# Altium schematic symbol library TitansLib.SchLib: 462 symbols (part 10 of 24)
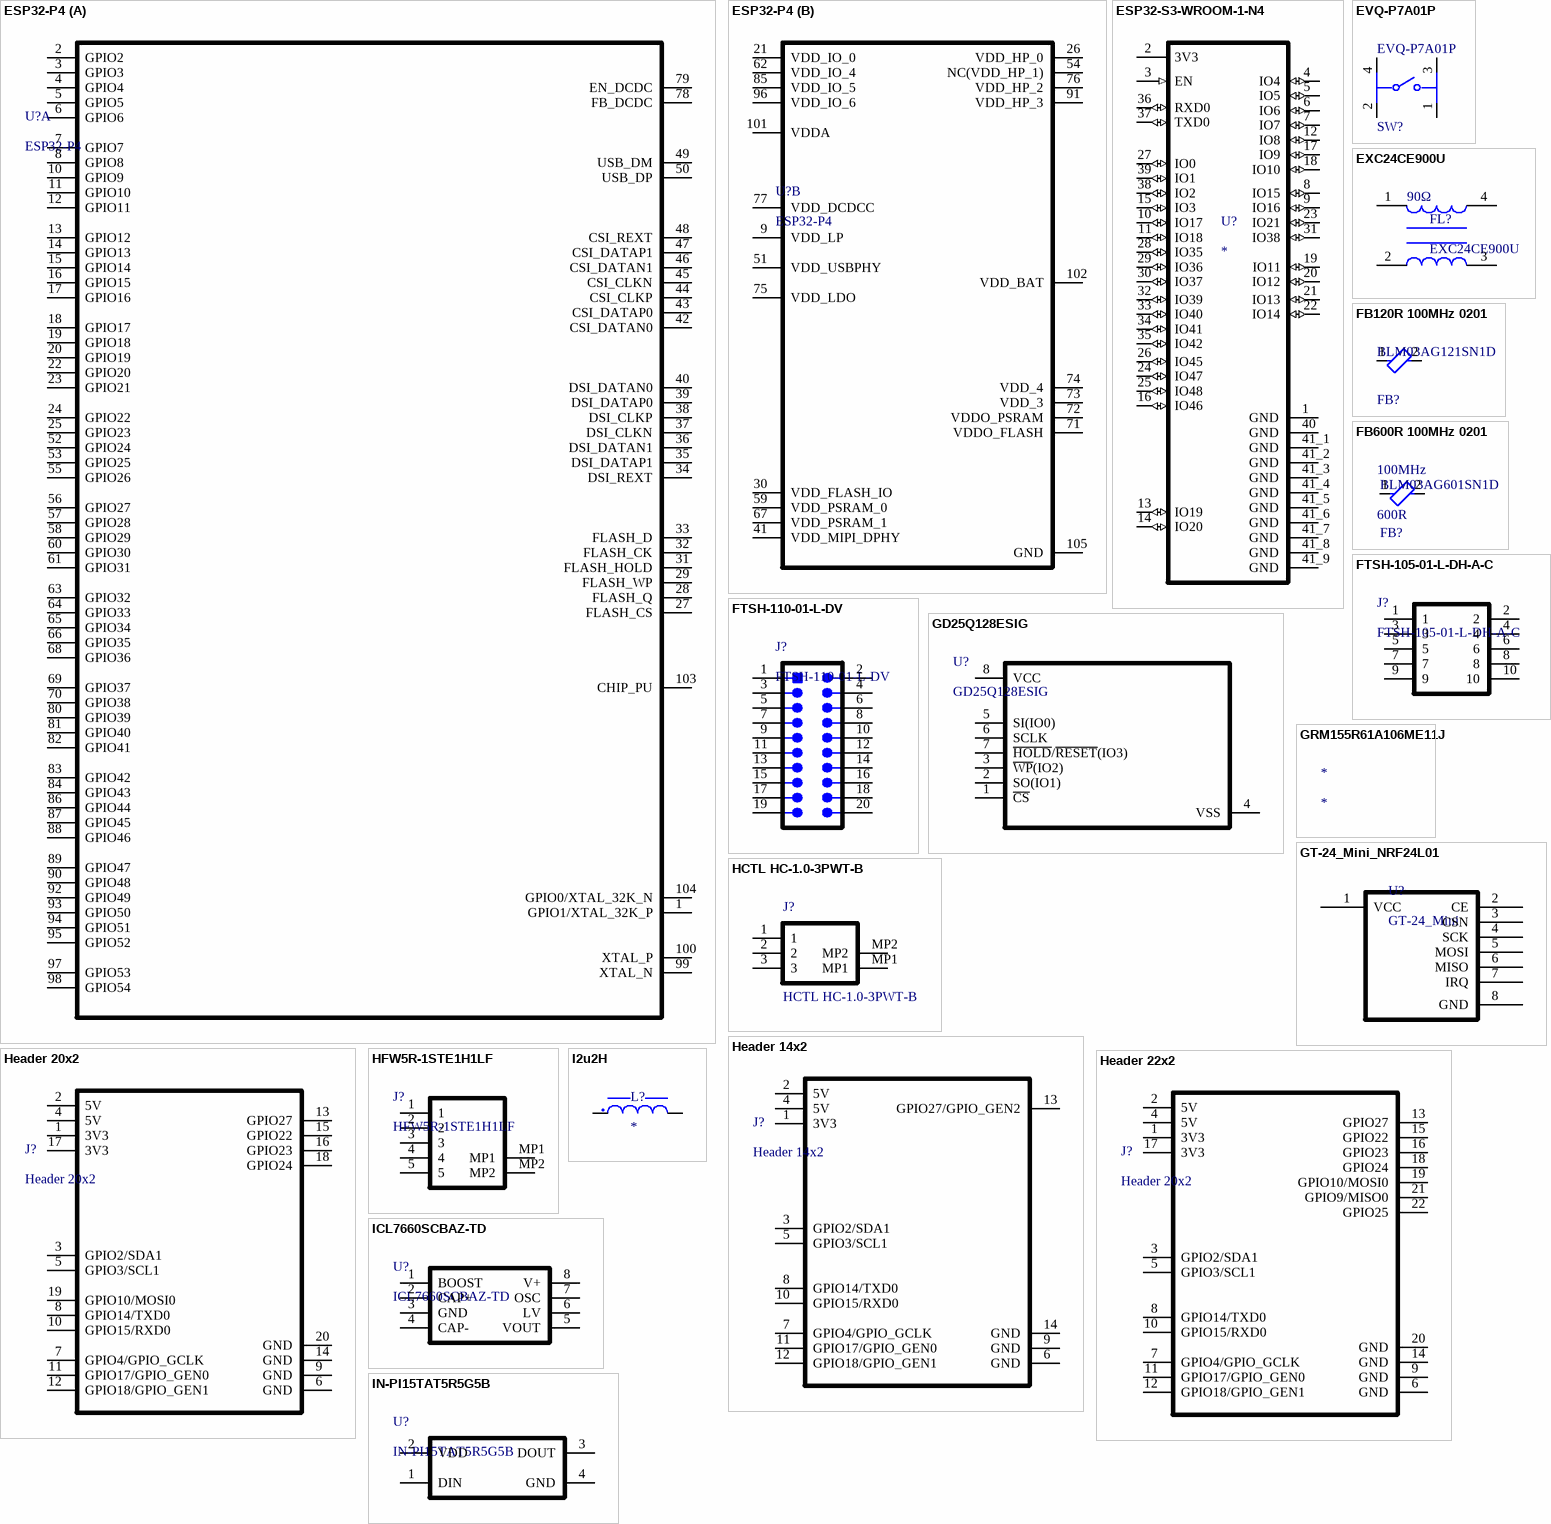
[diagram p26: symbols ESP32-P4 to IN-PI15TAT5R5G5B]

## Header 20x2
designator J?
Conn Unshrouded Header HDR 20 POS 2.54mm Solder ST Top Entry Thru-Hole BergStik®; Manufacturer: Amphenol Communications Solutions; Manufacturer Part Number: 67996-420HLF; Connector Type: Male Pin; Current Rating: 3A; Gender: Male; Insulation Resistance: 5GΩ; Lead Length: 2.41mm; Mating Post Length: 5.84mm; Max Voltage Rating (AC): 1.5kV; Number of Contacts: 20; Supplier: DigiKey; Supplier Part Number: 609-3221-ND; RoHS: Compliant; Category: Headers and Wire Housings; Stock: 10896; Pricing: 1=0.71, 10=0.6, 200=0.48555, 600=0.44927, 1000=0.43336, 5000=0.38684, 10000=0.36839 (USD); China RoHS: Compliant; Color: Black; Contact Gender: Male; Contact Material: Tin; Contact Mating Length: 5.842mm; Contact Plating: Tin; Depth: 4.83mm; Height: 8.71mm; Housing Color: Black; Housing Material: Thermoplastic; Length: 25.4mm; Lifecycle Status: Production; Max Operating Temperature: 125°C; Min Operating Temperature: -65°C; Mounting Technology: Through Hole; Pins: 20; Number of Positions: 20; Number of Rows: 2; Orientation: Straight; Packaging: Bulk; Pitch: 2.54mm; REACH SVHC: Yes; Row Spacing: 2.54mm; Terminal Pitch: 2.54mm; Termination: Solder; Voltage Rating: 1.5kV; ComponentLink1URL: https://datasheet.octopart.com:443/67996-420HLF-Amphenol-Communications-Solutions-datasheet-36854132.pdf?src-supplier=element14+APAC; ComponentLink1Description: https://datasheet.octopart.com:443/67996-420HLF-Amphenol-Communications-Solutions-datasheet-36854132.pdf?src-supplier=element14+APAC; ComponentLink2URL: https://datasheet.octopart.com:443/67996-420HLF-Areva-datasheet-10288749.pdf?src-supplier=Upverter; ComponentLink2Description: https://datasheet.octopart.com:443/67996-420HLF-Areva-datasheet-10288749.pdf?src-supplier=Upverter; ComponentLink3URL: https://datasheet.octopart.com:443/67996-420HLF-Areva-datasheet-10052131.pdf?src-supplier=Upverter; ComponentLink3Description: https://datasheet.octopart.com:443/67996-420HLF-Areva-datasheet-10052131.pdf?src-supplier=Upverter; ComponentLink4URL: https://datasheet.octopart.com:443/67996-420HLF-Areva-datasheet-8877144.pdf?src-supplier=Upverter; ComponentLink4Description: https://datasheet.octopart.com:443/67996-420HLF-Areva-datasheet-8877144.pdf?src-supplier=Upverter; ComponentLink5URL: https://datasheet.octopart.com:443/67996-420HLF-Areva-datasheet-8731571.pdf?src-supplier=Upverter; ComponentLink5Description: https://datasheet.octopart.com:443/67996-420HLF-Areva-datasheet-8731571.pdf?src-supplier=Upverter; ComponentLink6URL: https://datasheet.octopart.com:443/67996-420HLF-Areva-datasheet-8486089.pdf?src-supplier=Upverter; ComponentLink6Description: https://datasheet.octopart.com:443/67996-420HLF-Areva-datasheet-8486089.pdf?src-supplier=Upverter; ComponentLink7URL: https://datasheet.octopart.com:443/67996-420HLF-Amphenol-Communications-Solutions-datasheet-13408477.pdf?src-supplier=RS+(Formerly+Allied+Electronics); ComponentLink7Description: https://datasheet.octopart.com:443/67996-420HLF-Amphenol-Communications-Solutions-datasheet-13408477.pdf?src-supplier=RS+(Formerly+Allied+Electronics)
footprint Header2x20
pins: 1 3V3, 2 5V, 3 GPIO2/SDA1, 4 5V, 5 GPIO3/SCL1, 6 GND, 7 GPIO4/GPIO_GCLK, 8 GPIO14/TXD0, 9 GND, 10 GPIO15/RXD0, 11 GPIO17/GPIO_GEN0, 12 GPIO18/GPIO_GEN1, 13 GPIO27, 14 GND, 15 GPIO22, 16 GPIO23, 17 3V3, 18 GPIO24, 19 GPIO10/MOSI0, 20 GND

## Header 22x2
designator J?, comment Header 20x2
THT Vertical Pin Header WR-PHD, Pitch 2.54 mm, Dual Row, 22 pins; Manufacturer: Wurth Elektronik; Manufacturer Part Number: 61302221121; Connector Type: Male Pin; Contact Resistance: 20mΩ; Current Rating: 3A; Gender: Male; Number of Contacts: 22; Operating Supply Voltage: 250V; Pitch: 2.54mm; Supplier: DigiKey; Supplier Part Number: 732-5302-ND; RoHS: Compliant; Category: Headers and Wire Housings; Stock: 632; Pricing: 1=1.34, 10=1.136, 25=0.9476, 50=0.7894, 100=0.7173, 500=0.655 (USD); Color: Black; Contact Material: Copper; Contact Mating Length: 5.9944mm; Contact Plating: Gold; Lead Pitch: 2.54mm; Mounting Technology: Through Hole; Pins: 22; Number of Positions: 22; Number of Rows: 2; Orientation: Vertical; Packaging: Bulk; Row Spacing: 2.54mm; Termination: Solder; ComponentLink1URL: https://datasheet.octopart.com:443/61302221121-W%C3%BCrth-Elektronik-datasheet-45185731.pdf?src-supplier=Wurth+Elektronik; ComponentLink1Description: https://datasheet.octopart.com:443/61302221121-W%C3%BCrth-Elektronik-datasheet-45185731.pdf?src-supplier=Wurth+Elektronik; ComponentLink2URL: https://datasheet.octopart.com:443/61302221121-W%C3%BCrth-Elektronik-datasheet-149524204.pdf?src-supplier=Future+Electronics; ComponentLink2Description: https://datasheet.octopart.com:443/61302221121-W%C3%BCrth-Elektronik-datasheet-149524204.pdf?src-supplier=Future+Electronics; ComponentLink3URL: https://datasheet.octopart.com:443/61302221121-W%C3%BCrth-Elektronik-datasheet-10693404.pdf?src-supplier=Newark; ComponentLink3Description: https://datasheet.octopart.com:443/61302221121-W%C3%BCrth-Elektronik-datasheet-10693404.pdf?src-supplier=Newark
footprint Header2x22
pins: 1 3V3, 2 5V, 3 GPIO2/SDA1, 4 5V, 5 GPIO3/SCL1, 6 GND, 7 GPIO4/GPIO_GCLK, 8 GPIO14/TXD0, 9 GND, 10 GPIO15/RXD0, 11 GPIO17/GPIO_GEN0, 12 GPIO18/GPIO_GEN1, 13 GPIO27, 14 GND, 15 GPIO22, 16 GPIO23, 17 3V3, 18 GPIO24, 19 GPIO10/MOSI0, 20 GND, 21 GPIO9/MISO0, 22 GPIO25

## HFW5R-1STE1H1LF
designator J?
Ffc/Fpc Connector, 5 Contact(S), 1 Row(S), Female, Right Angle, 0.039 Inch Pitch, Surface Mount; Manufacturer: Amphenol Communications Solutions; Contact Resistance: 30mΩ; Current Rating: 1A; Insulation Resistance: 500MΩ; Plating Thickness: 2.0066µm; Supplier: DigiKey; Supplier Part Number: 609-HFW5R-1STE1H1LFCT-ND; Manufacturer Part Number: HFW5R-1STE1H1LF; RoHS: Compliant; Category: Card Edge Connectors; Stock: 41920; Pricing: 1=0.24, 10=0.208, 25=0.1948, 50=0.1856, 100=0.1766, 250=0.16556, 500=0.15764, 1000=0.15011 (USD); Contact Gender: Female; Lifecycle Status: Production; Max Operating Temperature: 105°C; Min Operating Temperature: -55°C; Pins: 5; Number of Rows: 1; REACH SVHC: Yes; Terminal Pitch: 1mm; ComponentLink1URL: https://datasheet.octopart.com:443/HFW5R-1STE1H1LF-Amphenol-Communications-Solutions-datasheet-154833502.pdf?src-supplier=Master+Electronics; ComponentLink1Description: https://datasheet.octopart.com:443/HFW5R-1STE1H1LF-Amphenol-Communications-Solutions-datasheet-154833502.pdf?src-supplier=Master+Electronics; ComponentLink2URL: https://datasheet.octopart.com:443/HFW5R-1STE1H1LF-Amphenol-Communications-Solutions-datasheet-189096500.pdf?src-supplier=Electro+Sonic; ComponentLink2Description: https://datasheet.octopart.com:443/HFW5R-1STE1H1LF-Amphenol-Communications-Solutions-datasheet-189096500.pdf?src-supplier=Electro+Sonic; Supplier 1: DigiKey; Supplier Part Number 1: 609-HFW5R-1STE1H1LFCT-ND; Supplier 2: DigiKey; Supplier Part Number 2: 609-HFW5R-1STE1H1LFTR-ND; Supplier 3: Mouser; Supplier Part Number 3: 649-HFW5R-1STE1H1LF
footprint HFW5R-1STE1H1LF
pins: 1, 2, 3, 4, 5, MP1, MP2

## I2u2H
designator L?
FIXED IND 2.2UH 3.25A 0.061OHM; MF: WÃ¼rth Elektronik; MP: 74437324022; SnapEDA_Link: https://www.snapeda.com/parts/74437324022/W%25C3%25BCrth+Elektronik+Midcom/view-part/?ref=snap; Package: Nonstandard WÃ¼rth Elektronik; Value: *; Check_prices: https://www.snapeda.com/parts/74437324022/W%25C3%25BCrth+Elektronik+Midcom/view-part/?ref=eda
footprint WE-LHMI_4020
pins: 1, 2

## ICL7660SCBAZ-TD
designator U?
Inverted 5kHz SOP-8 Voltage Regulators - DC DC Switching Regulators RoHS; Manufacturer 1: TDSEMIC; Datasheet Link: https://www.lcsc.com/datasheet/C42421902.pdf; Height: 1.75mm; Manufacturer Part Number 1: ICL7660SCBAZ-TD; Supplier Part Number 1: C42421902; Supplier Link 1: https://www.lcsc.com/product-detail/C42421902.html?s_z=n_ICL7660SCBAZ; Supplier 1: LCSC; Supplier Unit Price 1: 0.207
footprint SOIC127P600X175-8N
pins: 1 BOOST, 2 CAP+, 3 GND, 4 CAP-, 5 VOUT, 6 LV, 7 OSC, 8 V+

## IN-PI15TAT5R5G5B
designator U?
Triple Color LED, Red/green/blue, 1.5mm; Manufacturer 1: Inolux; Number of Circuits: 1; Shape: Square; Supplier 1: DigiKey; Supplier Part Number 1: 1830-IN-PI15TAT5R5G5BCT-ND; Manufacturer Part Number 1: IN-PI15TAT5R5G5B; RoHS: Compliant; Category: LEDs; Stock: 28900; Supplier Unit Price ': 0.51; Height: 650µm; Max Operating Temperature: 80°C; Min Operating Temperature: -40°C; Mounting Technology: Surface Mount; Number of Terminals: 4; Packaging: Bulk; REACH SVHC: Yes; Terminal Pitch: 900µm
footprint IN-PI15TAT5R5G5B
pins: 1 DIN, 2 VDD, 3 DOUT, 4 GND

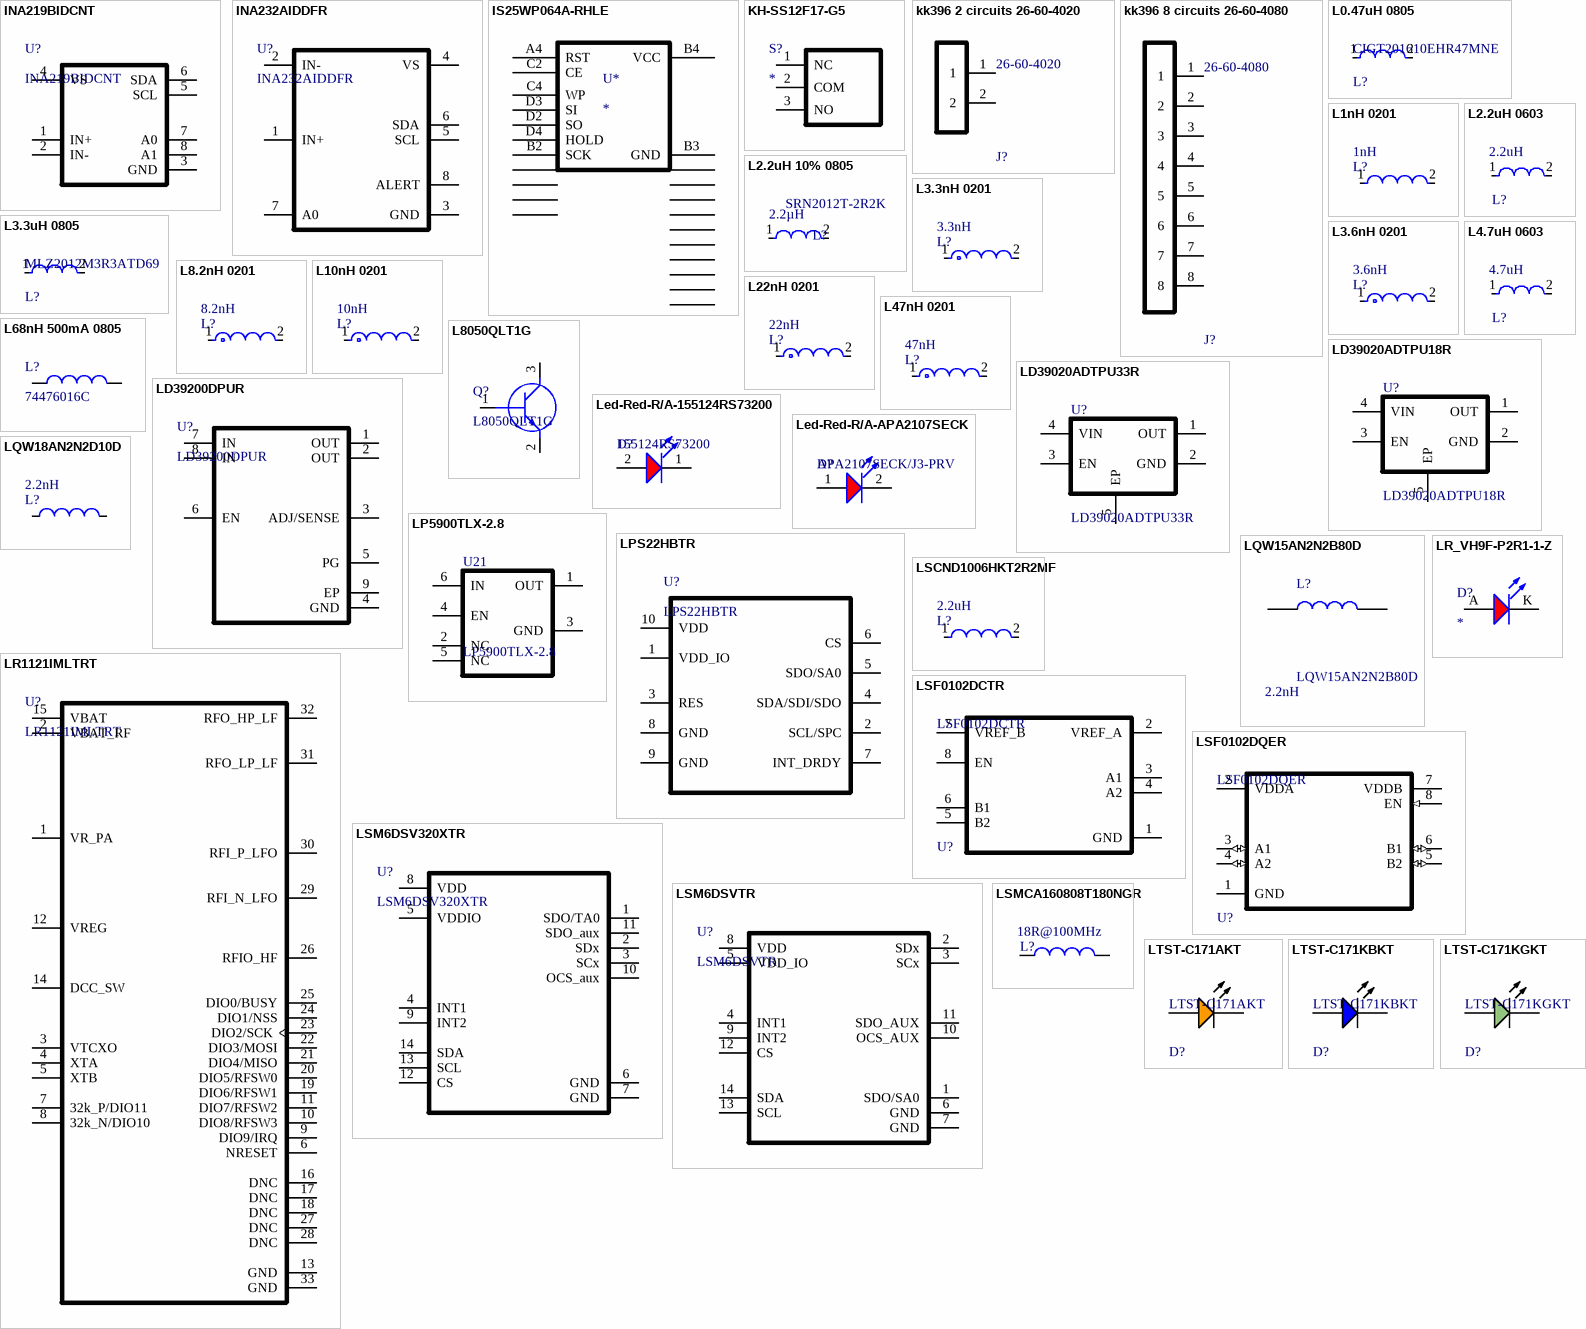
[diagram p6: symbols INA219BIDCNT to LTST-C171KGKT]

## INA219BIDCNT
designator U?
Power Supply Support Circuit, Fixed, 2 Channel, 2V, PDSO8; Manufacturer: Texas Instruments; Package Body Material: Plastic; Adjustable Threshold: No; Number of Channels: 2; Channels: 1; Package Equivalence Code: TSSOP8,.1; Power Supplies: 3.3V; Supply Current-Max (Isup): 1mA; Max Supply Voltage: 5.5V; Min Supply Voltage: 3V; Qualification Status: Not Qualified; Supplier: Digikey; Supplier Part Number: 296-27898-1-ND; Manufacturer Part Number: INA219BIDCNT; RoHS: Yes; Category: Amplifiers - Op Amps, Buffer, Instrumentation; Stock: 1316; Pricing: 1=2.9, 10=2.171, 25=1.988, 100=1.7864 (USD); Case/Package: LSSOP; Pins: 8; Package Shape: Rectangular; Terminal Finish: Nickel; Min Operating Temperature: -40°C; Max Operating Temperature: 125°C; JESD-609 Code: e4; Throw Configuration: POWER SUPPLY SUPPORT CIRCUIT; JESD-30 Code: R-PDSO-G8; Moisture Sensitivity Level: 2; Package Style: SMALL OUTLINE, LOW PROFILE, SHRINK PITCHMeter; Peak Reflow Temperature (Cel): 260°C; Nominal Supply Voltage: 3.3V; Surface Mount: Yes; Terminal Form: Gull Wing; Terminal Position: DUAL; Length: 2.9mm; Width: 1.6mm; Height - Seated (Max): 1.45mm; Terminal Pitch: 0.65mm; Temperature Grade: AUTOMOTIVE; Reach SVHC Compliant: Yes; RoHS Compliant: Yes; ComponentLink1URL: https://www.ti.com:443/lit/ds/symlink/ina219.pdf?src-supplier=IHS+Markit; ComponentLink1Description: https://www.ti.com:443/lit/ds/symlink/ina219.pdf?src-supplier=IHS+Markit; ComponentLink2URL: https://datasheet.ciiva.com/1492/ina219-1492144.pdf?src-supplier=Farnell; ComponentLink2Description: https://datasheet.ciiva.com/1492/ina219-1492144.pdf?src-supplier=Farnell; ComponentLink3URL: https://datasheet.ciiva.com/14180/ina219-end-ds-14180063.pdf?src-supplier=Distrelec; ComponentLink3Description: https://datasheet.ciiva.com/14180/ina219-end-ds-14180063.pdf?src-supplier=Distrelec; ComponentLink4URL: https://datasheet.ciiva.com/15132/getdatasheetpartid-294384-15132604.pdf?src-supplier=Verical; ComponentLink4Description: https://datasheet.ciiva.com/15132/getdatasheetpartid-294384-15132604.pdf?src-supplier=Verical; ComponentLink5URL: https://datasheet.ciiva.com/1939/ina219-1939657.pdf?src-supplier=Digikey; ComponentLink5Description: https://datasheet.ciiva.com/1939/ina219-1939657.pdf?src-supplier=Digikey; ComponentLink6URL: https://datasheet.ciiva.com/1939/ina219-1939658.pdf?src-supplier=Digikey; ComponentLink6Description: https://datasheet.ciiva.com/1939/ina219-1939658.pdf?src-supplier=Digikey; ComponentLink7URL: https://datasheet.ciiva.com/1939/ina219-1939659.pdf?src-supplier=Digikey; ComponentLink7Description: https://datasheet.ciiva.com/1939/ina219-1939659.pdf?src-supplier=Digikey; ComponentLink8URL: https://datasheet.ciiva.com/2965/ina219-2965730.pdf?src-supplier=Avnet; ComponentLink8Description: https://datasheet.ciiva.com/2965/ina219-2965730.pdf?src-supplier=Avnet; ComponentLink9URL: https://datasheet.ciiva.com/1484/1725057-1484940.pdf?src-supplier=Element14; ComponentLink9Description: https://datasheet.ciiva.com/1484/1725057-1484940.pdf?src-supplier=Element14
footprint SOT23_8 (SOT23, 8-Leads, Body 3x1.75mm, Pitch 0.65mm, IPC Low Density)
pins: 1 IN+, 2 IN-, 3 GND, 4 VS, 5 SCL, 6 SDA, 7 A0, 8 A1

## INA232AIDDFR
designator U?
48-V, 16-bit high-precision I²C output digital power monitor with alert 8-SOT-23-THIN -40 to 125; Manufacturer: Texas Instruments; Manufacturer Lifecycle Status: ACTIVE; Supplier: DigiKey; Supplier Part Number: 296-INA232AIDDFRCT-ND; Manufacturer Part Number: INA232AIDDFR; RoHS: Compliant; Category: Amplifiers - Op Amps, Buffer, Instrumentation; Stock: 56351; Pricing: 1=1.81, 10=1.331, 25=1.2108, 100=1.0789, 250=1.01592, 500=0.97796, 1000=0.94672 (USD); Height: 1.1mm; Length: 2.9mm; Lifecycle Status: Production; Pins: 8; Thickness: 850µm; Width: 1.6mm; ComponentLink1URL: https://sigma.octopart.com:443/179816939/technical_drawing/Texas-Instruments-INA232AIDDFR.pdf?src-supplier=Texas+Instruments; ComponentLink1Description: https://sigma.octopart.com:443/179816939/technical_drawing/Texas-Instruments-INA232AIDDFR.pdf?src-supplier=Texas+Instruments; ComponentLink2URL: https://octopart.com:443/opatz8j6/c1?t=tdcfrfqlwMMvvah5lNUfK0MzpbXfhr8Ppm7Qm2sQp30Znx2F_TE0U3qagWPwHuY8wCYu6NZgeB7h5wJcviHvOBj91G8t2zmsw1ir4e8XVxl_AkrUR1Q7hlbS7AqVegXtlb1UQ0cUuezrbYL1CWbHgObrkgHRgBQUmOFsUdfdaIVoH-iZCWphwrizwSyTPPQoPQXjcu9aZnEDXH83wP6yWy30kqFWMAB2Y55cF7h0oPREyqdZo_whrT0G2HMY5r0-RtWScHvstvJZ-xUCg6VGekmohWS3IcqBHUTZnmfjF6gP6ju7OJa-OC3COYZu65hqQ0Qlo-R8JF_oacVkJD61faW_3iE5_4-CLPsP_Tfry8LzxNbisJ6SfddldquHlpcKEkocSto&src-supplier=Texas+Instruments; ComponentLink2Description: https://octopart.com:443/opatz8j6/c1?t=tdcfrfqlwMMvvah5lNUfK0MzpbXfhr8Ppm7Qm2sQp30Znx2F_TE0U3qagWPwHuY8wCYu6NZgeB7h5wJcviHvOBj91G8t2zmsw1ir4e8XVxl_AkrUR1Q7hlbS7AqVegXtlb1UQ0cUuezrbYL1CWbHgObrkgHRgBQUmOFsUdfdaIVoH-iZCWphwrizwSyTPPQoPQXjcu9aZnEDXH83wP6yWy30kqFWMAB2Y55cF7h0oPREyqdZo_whrT0G2HMY5r0-RtWScHvstvJZ-xUCg6VGekmohWS3IcqBHUTZnmfjF6gP6ju7OJa-OC3COYZu65hqQ0Qlo-R8JF_oacVkJD61faW_3iE5_4-CLPsP_Tfry8LzxNbisJ6SfddldquHlpcKEkocSto&src-supplier=Texas+Instruments; ComponentLink3URL: https://sigma.octopart.com:443/178868995/technical_drawing/Texas-Instruments-INA232AIDDFR.pdf?src-supplier=Texas+Instruments; ComponentLink3Description: https://sigma.octopart.com:443/178868995/technical_drawing/Texas-Instruments-INA232AIDDFR.pdf?src-supplier=Texas+Instruments; ComponentLink4URL: https://sigma.octopart.com:443/165875829/technical_drawing/Texas-Instruments-INA232AIDDFR.pdf?src-supplier=Texas+Instruments; ComponentLink4Description: https://sigma.octopart.com:443/165875829/technical_drawing/Texas-Instruments-INA232AIDDFR.pdf?src-supplier=Texas+Instruments; ComponentLink5URL: http://sigma.octopart.com:80/reach_statement/Texas-Instruments-company-64.pdf?src-supplier=Compliance+Statements; ComponentLink5Description: http://sigma.octopart.com:80/reach_statement/Texas-Instruments-company-64.pdf?src-supplier=Compliance+Statements; ComponentLink6URL: http://sigma.octopart.com:80/conflict_mineral_statement/Texas-Instruments-company-63.pdf?src-supplier=Compliance+Statements; ComponentLink6Description: http://sigma.octopart.com:80/conflict_mineral_statement/Texas-Instruments-company-63.pdf?src-supplier=Compliance+Statements; Supplier 1: DigiKey; Supplier Part Number 1: 296-INA232AIDDFRCT-ND; Supplier 2: DigiKey; Supplier Part Number 2: 296-INA232AIDDFRTR-ND; Supplier 3: Mouser; Supplier Part Number 3: 595-INA232AIDDFR
footprint INA32AIDDFR
pins: 1 IN+, 2 IN-, 3 GND, 4 VS, 5 SCL, 6 SDA, 7 A0, 8 ALERT

## IS25WP064A-RHLE
designator U*
NOR Flash Serial-SPI 1.8V 64Mbit 8M X 8bit 7ns/8ns 24-Pin TFBGA Tray; Manufacturer: ISSI; Manufacturer Part Number: IS25WP064A-RHLE; Interface: Serial; Clock Frequency: 133MHz; Max Supply Current: 29mA; Max Supply Voltage: 1.95V; Min Supply Voltage: 1.65V; Number of Circuits: 1; Supplier: DigiKey; Supplier Part Number: 706-1647-ND; RoHS: Compliant; Category: Flash; Stock: 443; Pricing: 1=3,02, 10=2,819, 25=2,7372, 50=2,6752, 100=2,6129, 480=2,47269, 960=2,4115, 1440=2,37603 (USD); China RoHS: Compliant; Country of Origin: Mainland China, Taiwan; Export Control Classification Number (ECCN) Code: EAR99; Height - Seated (Max): 1.2mm; Harmonized Tariff Schedule (HTS) Code: 8542.32.00.51; Introduction Date: 2016-02-01; Length: 5mm; Lifecycle Status: Production; Max Operating Temperature: 105°C; Memory Format: FLASH; Min Operating Temperature: -40°C; Number of Terminals: 24; Operating Supply Voltage: 1.8V; REACH SVHC: Yes; Temperature Grade: Industrial; Terminal Pitch: 1mm; Width: 5mm; ComponentLink1URL: https://datasheet.octopart.com:443/IS25WP064A-RHLE-ISSI-datasheet-154716939.pdf?src-supplier=IHS; ComponentLink1Description: https://datasheet.octopart.com:443/IS25WP064A-RHLE-ISSI-datasheet-154716939.pdf?src-supplier=IHS; ComponentLink2URL: https://datasheet.octopart.com:443/IS25WP064A-RHLE-ISSI-datasheet-157246014.pdf?src-supplier=SHENGYU+ELECTRONICS; ComponentLink2Description: https://datasheet.octopart.com:443/IS25WP064A-RHLE-ISSI-datasheet-157246014.pdf?src-supplier=SHENGYU+ELECTRONICS; Supplier 1: DigiKey; Supplier Part Number 1: 706-1647-ND; Supplier 2: Mouser; Supplier Part Number 2: 870-IS25WP064A-RHLE
footprint IS25WP064A (BGA, 24-Leads, Body 6,00x8,00mmx1,20mm, Pitch 1,00mm)
pins: A1 NC hidden, A2 NC hidden, A3 NC hidden, A4 RST, B1 NC hidden, B2 SCK, B3 GND, B4 VCC, C1 NC hidden, C2 CE, C3 NC hidden, C4 WP, D1 NC hidden, D2 SO, D3 SI, D4 HOLD, E1 NC hidden, E2 NC hidden, E3 NC hidden, E4 NC hidden, F1 NC hidden, F2 NC hidden, F3 NC hidden, F4 NC hidden

## KH-SS12F17-G5
designator S?
Switch; Manufacturer_Name: Shenzhen Kinghelm Elec; Manufacturer_Part_Number: KH-SS12F17-G5; Datasheet Link: https://www.kinghelm.net/slide-switch/501830.html; Height: 8.7mm
footprint KHSS12F17G5
pins: 1 NC, 2 COM, 3 NO

## kk396 2 circuits 26-60-4020
designator J?, comment 26-60-4020
CONN HEADER VERT 2POS 3.96MM; Number of Contacts: 2; Contact Resistance: 6mR; Current Rating: 7A; Gender: Male; Voltage Rating: 250V; Number of Lines: 1; Approvals: UL; Glow Wire Compliant: Non-compliant; Depth: 10.01mm; Color: Natural; Mount: Through Hole; Flammability Rating: UL94 V-0; Max Operating Temperature: 75°C; Termination: Solder; Lead Free: Lead Free; Length: 7.77mm; Height: 14.73mm; Min Operating Temperature: 0°C; Contact Gender: Male; Housing Material: Polyester; Number of Rows: 1; Material: Polyester; Fastening Type: Friction; Contact Material: Brass; Radiation Hardening: No; Pitch: 3.96mm; Number of Circuits: 2; Contact Plating: Tin; Packaging: Bulk; Housing Color: Natural; Contact Mating Length: 0.45inch; Contact Type: Male Pin; Number of Positions: 2; Orientation: Straight; Package Quantity: 1400; Series: KK® 41791; Max Voltage Rating (AC): 250V; RoHS Compliant: Yes; Max Current Rating: 7A; Number of Poles: 2
footprint FP-26-60-4020-MFG
pins: 1, 2

## kk396 8 circuits 26-60-4080
designator J?, comment 26-60-4080
26-60-4080 3.96mm (.156") Pitch KK® Solid Header, Vertical, Friction Lock, 8 Circuits, Tin (Sn) Plating; Manufacturer Lifecycle Status: ACTIVE; NexarPartId: 111878; Contact Resistance: 6mΩ; Voltage Rating: 250V; Gender: Male; Number of Positions: 8; Number of Lines: 1; Approvals: CSA, UL; Insulation Resistance: 50GΩ; Current Rating: 7A; Glow Wire Compliant: Non-compliant; Orientation: Vertical; Contact Gender: Male; Voltage Rating (AC): 250V; Radiation Hardening: No; Number of Contacts: 8; Height: 14.73mm; Max Operating Temperature: 75°C; Number of Rows: 1; RoHS: Compliant; REACH SVHC: Unknown; Packaging: Bulk; Color: Natural; Number of Circuits: 8; Pitch: 3.96mm; Depth: 10.01mm; Voltage Rating (DC): 250V; Housing Color: Natural; Lead Free: Lead Free; Plating: Tin; Country of Origin: US; Number of Pins: 8; Material: Polyester; Mount: Through Hole; Lifecycle Status: Production; Termination: Solder; Number of Poles: 8; Length: 31.55mm; Max Voltage Rating (AC): 250V; Contact Plating: Tin; Contact Material: Brass, Tin; Schedule B: 8536694040|8536694040|8536694040|8536694040|8536694040|8536694040|8536694040|8536694040|8536694040|8536694040|8536694040|8536694040|8536694040|8536694040|8536694040|8536694040|8536694040|8536694040|8536694040|8536694040|8536694040|8536694040|8536694040|85; Flammability Rating: UL94 V-0; Max Current Rating: 7A; Lead Pitch: 3.96mm; Housing Material: Polyester; Min Operating Temperature: -40°C
footprint FP-26-60-4080-MFG
pins: 1, 2, 3, 4, 5, 6, 7, 8

## L0.47uH 0805
designator L?, comment CIGT201610EHR47MNE
470 nH Shielded Thin Film Inductor 4.8 A 22mOhm Max 0806 (2016 Metric); Manufacturer: TDK; Manufacturer Part Number: MLZ2012M3R3ATD69; Manufacturer Lifecycle Status: PRODUCTION; Core Material: Ferrite; Current Rating: 500mA; DC Resistance (DCR): 260mΩ; Value: 3.3µH; Max Current Rating: 350mA; Number of Circuits: 1; Test Frequency: 2MHz; Tolerance: 20%; Supplier: DigiKey; Supplier Part Number: 445-180843-1-ND; RoHS: Compliant; Category: Fixed Inductors; Stock: 46052; Pricing: 1=0.3, 10=0.248, 25=0.2292, 50=0.2162, 100=0.2038, 250=0.18856, 500=0.17776, 1000=0.1676 (USD); Case/Package: 0805; Height: 1.25mm; Length: 2mm; Lifecycle Status: Production; Max Length: 2.2mm; Max Operating Temperature: 125°C; Max Width: 1.45mm; Min Length: 1.8mm; Min Operating Temperature: -55°C; Min Width: 1.05mm; Number of Terminals: 2; Ratings: AEC-Q200; REACH SVHC: Yes; RMS Current (Irms): 500mA; Saturation Current: 350mA; Schedule B: 8504500000, 8504500000|8504500000|8504500000|8504500000|8504500000; ESR: 260mΩ; Shielding: Shielded; Width: 1.25mm; ComponentLink1URL: https://datasheet.octopart.com:443/MLZ2012M3R3ATD69-TDK-datasheet-181268424.pdf?src-supplier=IHS; ComponentLink1Description: https://datasheet.octopart.com:443/MLZ2012M3R3ATD69-TDK-datasheet-181268424.pdf?src-supplier=IHS; ComponentLink2URL: https://datasheet.octopart.com:443/MLZ2012M3R3ATD69-TDK-datasheet-155380170.pdf?src-supplier=TDK; ComponentLink2Description: https://datasheet.octopart.com:443/MLZ2012M3R3ATD69-TDK-datasheet-155380170.pdf?src-supplier=TDK; ComponentLink3URL: https://datasheet.octopart.com:443/MLZ2012M3R3ATD69-TDK-datasheet-165734126.pdf?src-supplier=Burklin+Elektronik; ComponentLink3Description: https://datasheet.octopart.com:443/MLZ2012M3R3ATD69-TDK-datasheet-165734126.pdf?src-supplier=Burklin+Elektronik; ComponentLink4URL: https://datasheet.octopart.com:443/MLZ2012M3R3ATD69-TDK-datasheet-137868124.pdf?src-supplier=Future+Electronics; ComponentLink4Description: https://datasheet.octopart.com:443/MLZ2012M3R3ATD69-TDK-datasheet-137868124.pdf?src-supplier=Future+Electronics; ComponentLink5URL: https://datasheet.octopart.com:443/MLZ2012M3R3ATD69-TDK-datasheet-136874819.pdf?src-supplier=TME; ComponentLink5Description: https://datasheet.octopart.com:443/MLZ2012M3R3ATD69-TDK-datasheet-136874819.pdf?src-supplier=TME; Supplier 1: DigiKey; Supplier Part Number 1: 1276-6902-1-ND; Supplier 2: DigiKey; Supplier Part Number 2: 1276-6902-6-ND
footprint MLZ2012-1_25
pins: 1, 2

## L1nH 0201
designator L?, comment value 1nH  (hidden comment: LQP03TN1N0B02D)
Inductor RF Chip Thin Film 1nH 0.1nH 500MHz 14Q-Factor 750mA 100mOhm DCR 0201 Paper T/R; Manufacturer: Murata; Manufacturer Lifecycle Status: IN PRODUCTION; Core Material: Non-Magnetic; Current: 600mA; DC Resistance (DCR): 100mΩ; Number of Circuits: 1; Q Factor: 14; Self Resonant Frequency: 17GHz; Shielding: Unshielded; Tolerance: 10%; Supplier: DigiKey; Supplier Part Number: 490-6714-1-ND; Manufacturer Part Number: LQP03TN1N0B02D; RoHS: Compliant; Category: Fixed Inductors; Stock: 282641; Pricing: 1=0.1, 10=0.03, 100=0.0245, 1000=0.02015, 5000=0.01757 (USD); Ambient Temperature Range High: 125°C; Case/Package: 0201; Case Code (Imperial): 0201; Case Code (Metric): 0603; Composition: Thin Film; Country of Origin: Japan; Current Rating: 750mA; DC Current: 750mA; Depth: 330µm; Export Control Classification Number (ECCN) Code: EAR99; Height: 300µm; Height - Seated (Max): 330.2µm; Harmonized Tariff Schedule (HTS) Code: 8504.50.80.00; Introduction Date: 2010-04-15; Length: 600µm; Lifecycle Status: Production; Max Current Rating: 750mA; Max DC Current: 750mA; Max Operating Temperature: 125°C; Military Standard: Not; Min Operating Temperature: -55°C; Mounting Technology: Surface Mount; Number of Terminals: 2; Packaging: Cut Tape; Radiation Hardening: No; REACH SVHC: Yes; RMS Current (Irms): 750mA; Schedule B: 8504500000, 8504500000|8504500000, 8504500000|8504500000|8504500000, 8504500000|8504500000|8504500000|8504500000; ESR: 100mΩ; Termination: SMD/SMT; Test Frequency: 500MHz; Width: 300µm; ComponentLink1URL: https://datasheet.octopart.com:443/LQP03TN1N0B02D-Murata-datasheet-39128545.pdf?src-supplier=Newark; ComponentLink1Description: https://datasheet.octopart.com:443/LQP03TN1N0B02D-Murata-datasheet-39128545.pdf?src-supplier=Newark; ComponentLink2URL: https://datasheet.octopart.com:443/LQP03TN1N0B02D-Murata-datasheet-11551019.pdf?src-supplier=_legacy+Avnet; ComponentLink2Description: https://datasheet.octopart.com:443/LQP03TN1N0B02D-Murata-datasheet-11551019.pdf?src-supplier=_legacy+Avnet; ComponentLink3URL: https://datasheet.octopart.com:443/LQP03TN1N0B02D-Murata-datasheet-140715373.pdf?src-supplier=Ciiva; ComponentLink3Description: https://datasheet.octopart.com:443/LQP03TN1N0B02D-Murata-datasheet-140715373.pdf?src-supplier=Ciiva; ComponentLink4URL: https://datasheet.octopart.com:443/LQP03TN1N0B02D-Murata-datasheet-138756448.pdf?src-supplier=Ciiva; ComponentLink4Description: https://datasheet.octopart.com:443/LQP03TN1N0B02D-Murata-datasheet-138756448.pdf?src-supplier=Ciiva; ComponentLink5URL: https://datasheet.octopart.com:443/LQP03TN1N0B02D-Murata-datasheet-142046051.pdf?src-supplier=Arrow.cn; ComponentLink5Description: https://datasheet.octopart.com:443/LQP03TN1N0B02D-Murata-datasheet-142046051.pdf?src-supplier=Arrow.cn; ComponentLink6URL: https://datasheet.octopart.com:443/LQP03TN1N0B02D-Murata-datasheet-141404629.pdf?src-supplier=TME; ComponentLink6Description: https://datasheet.octopart.com:443/LQP03TN1N0B02D-Murata-datasheet-141404629.pdf?src-supplier=TME; ComponentLink7URL: https://datasheet.octopart.com:443/LQP03TN1N0B02D-Murata-datasheet-80324116.pdf?src-supplier=Geoflip; ComponentLink7Description: https://datasheet.octopart.com:443/LQP03TN1N0B02D-Murata-datasheet-80324116.pdf?src-supplier=Geoflip; ComponentLink8URL: https://datasheet.octopart.com/LQP03TN1N0B02D-Murata-datasheet-14391931.pdf; ComponentLink8Description: https://datasheet.octopart.com/LQP03TN1N0B02D-Murata-datasheet-14391931.pdf; ComponentLink9URL: http://sigma.octopart.com:80/reach_statement/Murata-company-16.pdf?src-supplier=Compliance+Statements; ComponentLink9Description: http://sigma.octopart.com:80/reach_statement/Murata-company-16.pdf?src-supplier=Compliance+Statements
footprint INDC0603X03N (Chip Inductor, 2-Leads, Body 0.60x0.30mm, IPC Medium Density)
pins: 1, 2

## L2.2uH 10% 0805
designator L?, comment SRN2012T-2R2K  value 2.2µH
General Purpose Inductor, 2.2uH, 10%, 1 Element, Ferrite-Core, SMD, 0805; Manufacturer: Bourns; DC Resistance (DCR): 180mΩ; Max Current Rating: 1.04A; Number of Circuits: 1; Self Resonant Frequency: 100MHz; Shielding: Shielded; Test Frequency: 7.9MHz; Supplier: Newark; Supplier Part Number: SRN2012T-2R2K; Manufacturer Part Number: SRN2012T-2R2K; RoHS: Compliant; Category: Fixed Inductors; Stock: 645; Pricing: 5=0,146, 10=0,137 (USD); Case/Package: 0805; Core Material: Ferrite; Export Control Classification Number (ECCN) Code: EAR99; Height: 1.2mm; Harmonized Tariff Schedule (HTS) Code: 8504.50.80.00; Introduction Date: 2021-10-11; Length: 2mm; Lifecycle Status: Production; Max Operating Temperature: 125°C; Min Operating Temperature: -40°C; Number of Terminals: 2; REACH SVHC: Yes; Schedule B: 8504500000|8504500000|8504500000|8504500000|8504500000; Tolerance: 10%; Width: 1.2mm; ComponentLink1URL: https://datasheet.octopart.com:443/SRN2012T-2R2K-Bourns-datasheet-179982034.pdf?src-supplier=IHS; ComponentLink1Description: https://datasheet.octopart.com:443/SRN2012T-2R2K-Bourns-datasheet-179982034.pdf?src-supplier=IHS; ComponentLink2URL: http://sigma.octopart.com:80/conflict_mineral_statement/Bourns-company-36.pdf?src-supplier=Compliance+Statements; ComponentLink2Description: http://sigma.octopart.com:80/conflict_mineral_statement/Bourns-company-36.pdf?src-supplier=Compliance+Statements; Supplier 1: DigiKey; Supplier Part Number 1: 118-SRN2012T-2R2KCT-ND; Supplier 2: DigiKey; Supplier Part Number 2: 118-SRN2012T-2R2KDKR-ND; Supplier 3: Mouser; Supplier Part Number 3: 652-SRN2012T-2R2K
footprint C0805_H1P45
pins: 1, 2

## L2.2uH 0603
designator L?, comment value 2.2uH  (hidden comment: MLZ1608A2R2WTD25)
General Purpose Inductor, 2.2uH, 20%, 1 Element, Ferrite-Core, SMD, 0603; Manufacturer: TDK; Manufacturer Lifecycle Status: PRODUCTION; Current Rating: 500mA; DC Resistance (DCR): 325mΩ; Number of Circuits: 1; Saturation Current: 130mA; Shielding: Shielded; Test Frequency: 10MHz; Supplier 1: DigiKey; Supplier Part Number 1: 445-MLZ1608A2R2WTD25CT-ND; Supplier 2: DigiKey; Supplier Part Number 2: 445-MLZ1608A2R2WTD25DKR-ND; Supplier: DigiKey; Supplier Part Number: 445-MLZ1608A2R2WTD25CT-ND; Manufacturer Part Number: MLZ1608A2R2WTD25; RoHS: Compliant; Category: Fixed Inductors; Stock: 186885; Pricing: 1=0,13, 10=0,109, 25=0,1012, 50=0,0954, 100=0,09, 250=0,08328, 500=0,0785, 1000=0,07401 (USD); Case/Package: 0603; Core Material: Ferrite; Export Control Classification Number (ECCN) Code: EAR99; Height: 800µm; Height - Seated (Max): 939.8µm; Harmonized Tariff Schedule (HTS) Code: 8504.50.80.00; Introduction Date: 2013-11-01; Length: 1.6mm; Lifecycle Status: Production; Max Current Rating: 500mA; Max Length: 1.75mm; Max Operating Temperature: 125°C; Max Width: 950µm; Min Length: 1.45mm; Min Operating Temperature: -55°C; Min Width: 650µm; Mounting Technology: Surface Mount; Number of Terminals: 2; Packaging: Tape & Reel (TR); Ratings: AEC-Q200; REACH SVHC: Yes; RMS Current (Irms): 500mA; ESR: 325mΩ; Tolerance: 20%; Width: 800µm; ComponentLink1URL: https://datasheet.octopart.com:443/MLZ1608A2R2WTD25-TDK-datasheet-181268395.pdf?src-supplier=IHS; ComponentLink1Description: https://datasheet.octopart.com:443/MLZ1608A2R2WTD25-TDK-datasheet-181268395.pdf?src-supplier=IHS; ComponentLink2URL: https://datasheet.octopart.com:443/MLZ1608A2R2WTD25-TDK-datasheet-155327067.pdf?src-supplier=TDK; ComponentLink2Description: https://datasheet.octopart.com:443/MLZ1608A2R2WTD25-TDK-datasheet-155327067.pdf?src-supplier=TDK
footprint IND-L0603
pins: 1, 2

## L3.3nH 0201
designator L?, comment value 3.3nH  (hidden comment: LQP03TN3N3B02D)
Inductor RF Chip Thin Film 3.3nH 0.1nH 500MHz 14Q-Factor 450mA 250mOhm DCR 0201 Paper T/R; Manufacturer: Murata; Manufacturer Lifecycle Status: IN PRODUCTION; Core Material: Non-Magnetic; Current: 300mA; DC Resistance (DCR): 250mΩ; Number of Circuits: 1; Q Factor: 14; Self Resonant Frequency: 8GHz; Shielding: Unshielded; Tolerance: 3.03%; Supplier: DigiKey; Supplier Part Number: 490-6728-1-ND; Manufacturer Part Number: LQP03TN3N3B02D; RoHS: Compliant; Category: Fixed Inductors; Stock: 144086; Pricing: 1=0.1, 10=0.029, 100=0.0236, 1000=0.01938, 5000=0.0169 (USD); Case/Package: 0201; Case Code (Imperial): 0201; Case Code (Metric): 0603; Composition: Thin Film; Country of Origin: Japan; Current Rating: 450mA; DC Current: 450mA; Depth: 330µm; Export Control Classification Number (ECCN) Code: EAR99; Height: 300µm; Height - Seated (Max): 330.2µm; Harmonized Tariff Schedule (HTS) Code: 8504.50.80.00; Introduction Date: 2010-04-15; Lead Free: Lead Free; Length: 600µm; Lifecycle Status: Production; Max Current Rating: 450mA; Max DC Current: 450mA; Max Operating Temperature: 125°C; Military Standard: Not; Min Operating Temperature: -55°C; Mounting Technology: Surface Mount; Number of Terminals: 2; Packaging: Cut Tape; Radiation Hardening: No; REACH SVHC: Yes; RMS Current (Irms): 450mA; Schedule B: 8504500000, 8504500000|8504500000, 8504500000|8504500000|8504500000, 8504500000|8504500000|8504500000|8504500000; ESR: 250mΩ; Termination: SMD/SMT; Test Frequency: 500MHz; Width: 300µm; ComponentLink1URL: https://datasheet.octopart.com:443/LQP03TN3N3B02D-Murata-datasheet-80324116.pdf?src-supplier=Geoflip; ComponentLink1Description: https://datasheet.octopart.com:443/LQP03TN3N3B02D-Murata-datasheet-80324116.pdf?src-supplier=Geoflip; ComponentLink2URL: https://datasheet.octopart.com:443/LQP03TN3N3B02D-Murata-datasheet-14391968.pdf?src-supplier=Future+Electronics; ComponentLink2Description: https://datasheet.octopart.com:443/LQP03TN3N3B02D-Murata-datasheet-14391968.pdf?src-supplier=Future+Electronics; ComponentLink3URL: https://datasheet.octopart.com:443/LQP03TN3N3B02D-Murata-datasheet-44110306.pdf?src-supplier=Future+Electronics; ComponentLink3Description: https://datasheet.octopart.com:443/LQP03TN3N3B02D-Murata-datasheet-44110306.pdf?src-supplier=Future+Electronics; ComponentLink4URL: https://datasheet.octopart.com:443/LQP03TN3N3B02D-Murata-datasheet-140715565.pdf?src-supplier=Ciiva; ComponentLink4Description: https://datasheet.octopart.com:443/LQP03TN3N3B02D-Murata-datasheet-140715565.pdf?src-supplier=Ciiva; ComponentLink5URL: https://datasheet.octopart.com:443/LQP03TN3N3B02D-Murata-datasheet-138756643.pdf?src-supplier=Ciiva; ComponentLink5Description: https://datasheet.octopart.com:443/LQP03TN3N3B02D-Murata-datasheet-138756643.pdf?src-supplier=Ciiva; ComponentLink6URL: https://datasheet.octopart.com:443/LQP03TN3N3B02D-Murata-datasheet-143934148.pdf?src-supplier=Arrow.cn; ComponentLink6Description: https://datasheet.octopart.com:443/LQP03TN3N3B02D-Murata-datasheet-143934148.pdf?src-supplier=Arrow.cn; ComponentLink7URL: https://datasheet.octopart.com:443/LQP03TN3N3B02D-Murata-datasheet-141404629.pdf?src-supplier=TME; ComponentLink7Description: https://datasheet.octopart.com:443/LQP03TN3N3B02D-Murata-datasheet-141404629.pdf?src-supplier=TME; ComponentLink8URL: https://datasheet.octopart.com:443/LQP03TN3N3B02D-Murata-datasheet-11551019.pdf?src-supplier=_legacy+Avnet; ComponentLink8Description: https://datasheet.octopart.com:443/LQP03TN3N3B02D-Murata-datasheet-11551019.pdf?src-supplier=_legacy+Avnet; ComponentLink9URL: http://sigma.octopart.com:80/reach_statement/Murata-company-16.pdf?src-supplier=Compliance+Statements; ComponentLink9Description: http://sigma.octopart.com:80/reach_statement/Murata-company-16.pdf?src-supplier=Compliance+Statements
footprint INDC0603X03N (Chip Inductor, 2-Leads, Body 0.60x0.30mm, IPC Medium Density)
pins: 1, 2

## L3.3uH 0805
designator L?, comment MLZ2012M3R3ATD69
General Purpose Inductor, 3.3uH, 20%, 1 Element, Ferrite-Core, SMD, 0805; Manufacturer: TDK; Manufacturer Lifecycle Status: PRODUCTION; Current Rating: 500mA; DC Resistance (DCR): 260mΩ; Value: 3.3µH; Max Current Rating: 350mA; Number of Circuits: 1; Shielding: Shielded; Test Frequency: 2MHz; Supplier: DigiKey; Supplier Part Number: 445-180843-1-ND; Manufacturer Part Number: MLZ2012M3R3ATD69; RoHS: Compliant; Category: Fixed Inductors; Stock: 46052; Pricing: 1=0.3, 10=0.248, 25=0.2292, 50=0.2162, 100=0.2038, 250=0.18856, 500=0.17776, 1000=0.1676 (USD); Case/Package: 0805; Core Material: Ferrite; Height: 1.25mm; Length: 2mm; Lifecycle Status: Production; Max Length: 2.2mm; Max Operating Temperature: 125°C; Max Width: 1.45mm; Min Length: 1.8mm; Min Operating Temperature: -55°C; Min Width: 1.05mm; Number of Terminals: 2; Ratings: AEC-Q200; REACH SVHC: Yes; RMS Current (Irms): 500mA; Saturation Current: 350mA; Schedule B: 8504500000, 8504500000|8504500000|8504500000|8504500000|8504500000; ESR: 260mΩ; Tolerance: 20%; Width: 1.25mm; ComponentLink1URL: https://datasheet.octopart.com:443/MLZ2012M3R3ATD69-TDK-datasheet-181268424.pdf?src-supplier=IHS; ComponentLink1Description: https://datasheet.octopart.com:443/MLZ2012M3R3ATD69-TDK-datasheet-181268424.pdf?src-supplier=IHS; ComponentLink2URL: https://datasheet.octopart.com:443/MLZ2012M3R3ATD69-TDK-datasheet-155380170.pdf?src-supplier=TDK; ComponentLink2Description: https://datasheet.octopart.com:443/MLZ2012M3R3ATD69-TDK-datasheet-155380170.pdf?src-supplier=TDK; ComponentLink3URL: https://datasheet.octopart.com:443/MLZ2012M3R3ATD69-TDK-datasheet-165734126.pdf?src-supplier=Burklin+Elektronik; ComponentLink3Description: https://datasheet.octopart.com:443/MLZ2012M3R3ATD69-TDK-datasheet-165734126.pdf?src-supplier=Burklin+Elektronik; ComponentLink4URL: https://datasheet.octopart.com:443/MLZ2012M3R3ATD69-TDK-datasheet-137868124.pdf?src-supplier=Future+Electronics; ComponentLink4Description: https://datasheet.octopart.com:443/MLZ2012M3R3ATD69-TDK-datasheet-137868124.pdf?src-supplier=Future+Electronics; ComponentLink5URL: https://datasheet.octopart.com:443/MLZ2012M3R3ATD69-TDK-datasheet-136874819.pdf?src-supplier=TME; ComponentLink5Description: https://datasheet.octopart.com:443/MLZ2012M3R3ATD69-TDK-datasheet-136874819.pdf?src-supplier=TME
footprint MLZ2012-1_25
pins: 1, 2

## L3.6nH 0201
designator L?, comment value 3.6nH  (hidden comment: LQP03TN3N6B02D)
Inductor RF Chip Thin Film 3.6nH 0.1nH 500MHz 14Q-Factor 400mA 300mOhm DCR 0201 Paper T/R; Manufacturer: Murata; Manufacturer Lifecycle Status: IN PRODUCTION; Core Material: Non-Magnetic; Current: 300mA; DC Resistance (DCR): 300mΩ; Number of Circuits: 1; Q Factor: 14; Self Resonant Frequency: 6GHz; Shielding: Unshielded; Tolerance: 2.7778%; Supplier: DigiKey; Supplier Part Number: 490-6729-1-ND; Manufacturer Part Number: LQP03TN3N6B02D; RoHS: Compliant; Category: Fixed Inductors; Stock: 38163; Pricing: 1=0.1, 10=0.029, 100=0.0236, 1000=0.01938, 5000=0.0169 (USD); Case/Package: 0201; Case Code (Imperial): 0201; Case Code (Metric): 0603; Composition: Thin Film; Current Rating: 400mA; DC Current: 400mA; Depth: 330µm; Height: 300µm; Height - Seated (Max): 330.2µm; Length: 600µm; Lifecycle Status: Production; Max Current Rating: 400mA; Max DC Current: 400mA; Max Operating Temperature: 125°C; Military Standard: Not; Min Operating Temperature: -55°C; Mounting Technology: Surface Mount; Number of Terminals: 2; REACH SVHC: Yes; RMS Current (Irms): 400mA; Schedule B: 8504500000, 8504500000|8504500000, 8504500000|8504500000|8504500000, 8504500000|8504500000|8504500000|8504500000; ESR: 300mΩ; Termination: SMD/SMT; Test Frequency: 500MHz; Width: 300µm; ComponentLink1URL: https://datasheet.octopart.com:443/LQP03TN3N6B02D-Murata-datasheet-140715585.pdf?src-supplier=Ciiva; ComponentLink1Description: https://datasheet.octopart.com:443/LQP03TN3N6B02D-Murata-datasheet-140715585.pdf?src-supplier=Ciiva; ComponentLink2URL: https://datasheet.octopart.com:443/LQP03TN3N6B02D-Murata-datasheet-138756664.pdf?src-supplier=Ciiva; ComponentLink2Description: https://datasheet.octopart.com:443/LQP03TN3N6B02D-Murata-datasheet-138756664.pdf?src-supplier=Ciiva; ComponentLink3URL: https://datasheet.octopart.com:443/LQP03TN3N6B02D-Murata-datasheet-151378852.pdf?src-supplier=Arrow.cn; ComponentLink3Description: https://datasheet.octopart.com:443/LQP03TN3N6B02D-Murata-datasheet-151378852.pdf?src-supplier=Arrow.cn; ComponentLink4URL: https://datasheet.octopart.com:443/LQP03TN3N6B02D-Murata-datasheet-140569425.pdf?src-supplier=Arrow.cn; ComponentLink4Description: https://datasheet.octopart.com:443/LQP03TN3N6B02D-Murata-datasheet-140569425.pdf?src-supplier=Arrow.cn; ComponentLink5URL: https://datasheet.octopart.com:443/LQP03TN3N6B02D-Murata-datasheet-80324116.pdf?src-supplier=Geoflip; ComponentLink5Description: https://datasheet.octopart.com:443/LQP03TN3N6B02D-Murata-datasheet-80324116.pdf?src-supplier=Geoflip; ComponentLink6URL: https://datasheet.octopart.com:443/LQP03TN3N6B02D-Murata-datasheet-11551019.pdf?src-supplier=_legacy+Avnet; ComponentLink6Description: https://datasheet.octopart.com:443/LQP03TN3N6B02D-Murata-datasheet-11551019.pdf?src-supplier=_legacy+Avnet; ComponentLink7URL: https://datasheet.octopart.com/LQP03TN3N6B02D-Murata-datasheet-14392764.pdf; ComponentLink7Description: https://datasheet.octopart.com/LQP03TN3N6B02D-Murata-datasheet-14392764.pdf; ComponentLink8URL: http://sigma.octopart.com:80/reach_statement/Murata-company-16.pdf?src-supplier=Compliance+Statements; ComponentLink8Description: http://sigma.octopart.com:80/reach_statement/Murata-company-16.pdf?src-supplier=Compliance+Statements
footprint INDC0603X03N (Chip Inductor, 2-Leads, Body 0.60x0.30mm, IPC Medium Density)
pins: 1, 2

## L4.7uH 0603
designator L?, comment value 4.7uH  (hidden comment: MLZ1608M4R7WT000)
Inductor Power Shielded Multi-Layer 4.7uH 20% 2MHz Ferrite 0.12A 0.65Ohm DCR 0603 T/R; Manufacturer: TDK; Manufacturer Lifecycle Status: PRODUCTION; Current Rating: 350mA; DC Resistance (DCR): 650mΩ; Number of Circuits: 1; Saturation Current: 120mA; Self Resonant Frequency: 80MHz; Supplier: DigiKey; Supplier Part Number: 445-6390-1-ND; Manufacturer Part Number: MLZ1608M4R7WT000; RoHS: Compliant; Category: Fixed Inductors; Stock: 71798; Pricing: 1=0.1, 10=0.086, 100=0.0705, 1000=0.05793 (USD); Case/Package: 0603; Case Code (Imperial): 0603; Case Code (Metric): 1608; Core Material: Ferrite; Export Control Classification Number (ECCN) Code: EAR99; Height: 800µm; Height - Seated (Max): 939.8µm; Harmonized Tariff Schedule (HTS) Code: 8504.50.80.00; Introduction Date: 2012-05-14; Length: 1.6mm; Lifecycle Status: Production; Max Current Rating: 350mA; Max Length: 1.75mm; Max Operating Temperature: 125°C; Max Width: 950µm; Min Length: 1.45mm; Min Operating Temperature: -55°C; Min Width: 650µm; Mounting Technology: Surface Mount; Number of Terminals: 2; Packaging: Tape & Reel (TR); REACH SVHC: Yes; RMS Current (Irms): 350mA; Schedule B: 8504500000, 8504500000|8504500000|8504500000|8504500000|8504500000; ESR: 650mΩ; Shielding: Shielded; Test Frequency: 2MHz; Tolerance: 20%; Width: 800µm; ComponentLink1URL: https://datasheet.octopart.com:443/MLZ1608M4R7WT000-TDK-datasheet-155327068.pdf?src-supplier=ODG+(Origin+Data+Global); ComponentLink1Description: https://datasheet.octopart.com:443/MLZ1608M4R7WT000-TDK-datasheet-155327068.pdf?src-supplier=ODG+(Origin+Data+Global); ComponentLink2URL: https://datasheet.octopart.com:443/MLZ1608M4R7WT000-TDK-datasheet-170576133.pdf?src-supplier=Newark; ComponentLink2Description: https://datasheet.octopart.com:443/MLZ1608M4R7WT000-TDK-datasheet-170576133.pdf?src-supplier=Newark; ComponentLink3URL: https://datasheet.octopart.com:443/MLZ1608M4R7WT000-TDK-datasheet-12356712.pdf?src-supplier=Newark; ComponentLink3Description: https://datasheet.octopart.com:443/MLZ1608M4R7WT000-TDK-datasheet-12356712.pdf?src-supplier=Newark; ComponentLink4URL: https://datasheet.octopart.com:443/MLZ1608M4R7WT000-TDK-datasheet-136874818.pdf?src-supplier=TME; ComponentLink4Description: https://datasheet.octopart.com:443/MLZ1608M4R7WT000-TDK-datasheet-136874818.pdf?src-supplier=TME; ComponentLink5URL: https://datasheet.octopart.com:443/MLZ1608M4R7WT000-TDK-datasheet-62316133.pdf?src-supplier=Future+Electronics; ComponentLink5Description: https://datasheet.octopart.com:443/MLZ1608M4R7WT000-TDK-datasheet-62316133.pdf?src-supplier=Future+Electronics
footprint IND-L0603
pins: 1, 2

## L8.2nH 0201
designator L?, comment value 8.2nH  (hidden comment: LQP03TN8N2J02D)
Inductor RF Chip Thin Film 8.2nH 5% 500MHz 14Q-Factor 250mA 700mOhm DCR 0201 Paper T/R; Manufacturer: Murata; Manufacturer Lifecycle Status: IN PRODUCTION; Core Material: Non-Magnetic; DC Resistance (DCR): 700mΩ; Number of Circuits: 1; Q Factor: 14; Self Resonant Frequency: 3.6GHz; Shielding: Unshielded; Supplier: DigiKey; Supplier Part Number: 490-5566-1-ND; Manufacturer Part Number: LQP03TN8N2J02D; RoHS: Compliant; Category: Fixed Inductors; Stock: 437368; Pricing: 1=0.1, 10=0.024, 100=0.02, 1000=0.01644, 5000=0.01434 (USD); Case/Package: 0201; Case Code (Imperial): 0201; Case Code (Metric): 0603; Composition: Thin Film; Country of Origin: Japan; Current Rating: 250mA; DC Current: 250mA; Depth: 330µm; Export Control Classification Number (ECCN) Code: EAR99; Height: 300µm; Height - Seated (Max): 330.2µm; Harmonized Tariff Schedule (HTS) Code: 8504.50.80.00; Introduction Date: 2009-08-10; Length: 600µm; Lifecycle Status: Production; Max Current Rating: 250mA; Max DC Current: 250mA; Max Operating Temperature: 125°C; Military Standard: Not; Min Operating Temperature: -55°C; Mounting Technology: Surface Mount; Number of Terminals: 2; REACH SVHC: Yes; RMS Current (Irms): 250mA; Schedule B: 8504500000, 8504500000|8504500000|8504500000|8504500000|8504500000; ESR: 700mΩ; Termination: SMD/SMT; Test Frequency: 500MHz; Tolerance: 5%; Width: 300µm; ComponentLink1URL: https://datasheet.octopart.com:443/LQP03TN8N2J02D-Murata-datasheet-80324116.pdf?src-supplier=HQonline; ComponentLink1Description: https://datasheet.octopart.com:443/LQP03TN8N2J02D-Murata-datasheet-80324116.pdf?src-supplier=HQonline; ComponentLink2URL: https://datasheet.octopart.com:443/LQP03TN8N2J02D-Murata-datasheet-140715712.pdf?src-supplier=Ciiva; ComponentLink2Description: https://datasheet.octopart.com:443/LQP03TN8N2J02D-Murata-datasheet-140715712.pdf?src-supplier=Ciiva; ComponentLink3URL: https://datasheet.octopart.com:443/LQP03TN8N2J02D-Murata-datasheet-138756792.pdf?src-supplier=Ciiva; ComponentLink3Description: https://datasheet.octopart.com:443/LQP03TN8N2J02D-Murata-datasheet-138756792.pdf?src-supplier=Ciiva; ComponentLink4URL: https://datasheet.octopart.com:443/LQP03TN8N2J02D-Murata-datasheet-142046075.pdf?src-supplier=Arrow.cn; ComponentLink4Description: https://datasheet.octopart.com:443/LQP03TN8N2J02D-Murata-datasheet-142046075.pdf?src-supplier=Arrow.cn; ComponentLink5URL: https://datasheet.octopart.com:443/LQP03TN8N2J02D-Murata-datasheet-140569441.pdf?src-supplier=Arrow.cn; ComponentLink5Description: https://datasheet.octopart.com:443/LQP03TN8N2J02D-Murata-datasheet-140569441.pdf?src-supplier=Arrow.cn; ComponentLink6URL: https://datasheet.octopart.com:443/LQP03TN8N2J02D-Murata-datasheet-140317505.pdf?src-supplier=Farnell; ComponentLink6Description: https://datasheet.octopart.com:443/LQP03TN8N2J02D-Murata-datasheet-140317505.pdf?src-supplier=Farnell; ComponentLink7URL: https://datasheet.octopart.com:443/LQP03TN8N2J02D-Murata-datasheet-11551019.pdf?src-supplier=_legacy+Avnet; ComponentLink7Description: https://datasheet.octopart.com:443/LQP03TN8N2J02D-Murata-datasheet-11551019.pdf?src-supplier=_legacy+Avnet; ComponentLink8URL: https://datasheet.octopart.com/LQP03TN8N2J02D-Murata-datasheet-14392023.pdf; ComponentLink8Description: https://datasheet.octopart.com/LQP03TN8N2J02D-Murata-datasheet-14392023.pdf; ComponentLink9URL: http://sigma.octopart.com:80/reach_statement/Murata-company-16.pdf?src-supplier=Compliance+Statements; ComponentLink9Description: http://sigma.octopart.com:80/reach_statement/Murata-company-16.pdf?src-supplier=Compliance+Statements
footprint INDC0603X03N (Chip Inductor, 2-Leads, Body 0.60x0.30mm, IPC Medium Density)
pins: 1, 2